# Altium schematic symbol library PPTC121LFBN-RC.SchLib: 1 symbol
Pins are listed as number, name and electrical type; pins without a type are passive.

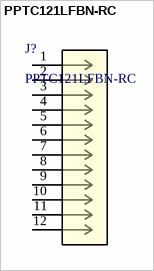
[diagram p0: symbol PPTC121LFBN-RC]

## PPTC121LFBN-RC
designator J?
CONN HEADER FEMALE 12POS.1 TIN; Manufacturer_Name: Sullins; Copyright: Copyright (C) 2026 Ultra Librarian. All rights reserved.; Manufacturer_Part_Number: PPTC121LFBN-RC; RefDes: RefDes; Type: Type
footprint Conn12_1p2x0p1_SUL
pins: 1, 2, 3, 4, 5, 6, 7, 8, 9, 10, 11, 12